# Altium schematic symbol library 560112110019.SchLib: 1 symbol
Pins are listed as number, name and electrical type; pins without a type are passive.

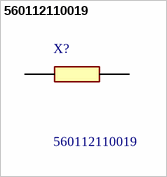
[diagram p0: symbol 560112110019]

## 560112110019
designator X?
WRIS-RSKS Anti-Sulfur Thick Film Resistors KS04021003F110KAATH0000; SMT Chip Standard Terminal;100 k; +/- 1 %; 0.1 W; +/- 100 ppm/ ; -55155 C; size 0402; LxWxH 1 x 0.5 x 0.35; UR 50 V; Manufacturer_Name: Wurth Elektronik; Geometry.Height: 0.35mm; Mouser Part Number: *; Mouser Price/Stock: *; Manufacturer_Part_Number: 560112110019; Datasheet Link: https://www.we-online.com/catalog/datasheet/560112110019.pdf
footprint RESC1005X35N
pins: 1, 2